# Altium footprint library Diodes.PcbLib: 4 footprints
Each footprint in its own frame and in the unit in brackets; x right, y up, seen from the top. Pads: shape width x height; smd on the part's side, far side on the other; paste and mask are expansions set on the pad; w line width, h text height; cw(c..) or ccw(c..) is an arc to the next point about the centre after c.
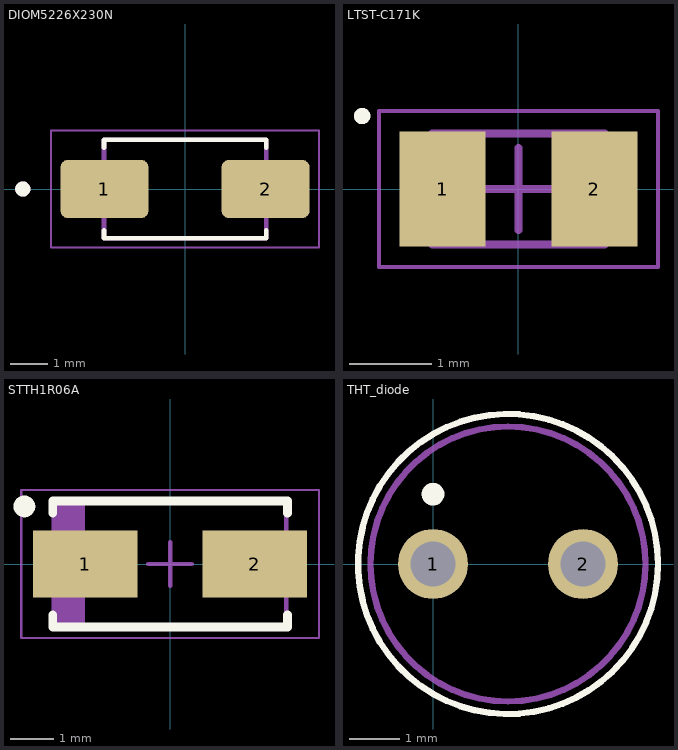
[diagram p0: the footprints below, top view; thin cyan lines are the x and y axes]

## DIOM5226X230N [mm]
pads (2):
  rrect25% 2.33x1.55 smd: 1(-2.135,0) 2(2.135,0)
Top Overlay:
  circle w0.2: c-4.3,0 r0.1
  lines w0.127: -2.15,-1.095 -2.15,-1.302 2.15,-1.302 2.15,-1.095 ; -2.15,1.095 -2.15,1.302 2.15,1.302 2.15,1.095
  text ".DESIGNATOR" at -3.536,1.618 h1
Mechanical 13:
  circle w0.2: c-4.3,0 r0.1
  lines w0.127: -2.15,-1.302 -2.15,1.302 2.15,1.302 2.15,-1.302 -2.15,-1.302
Mechanical 15:
  lines w0.05: -3.55,-1.552 3.55,-1.552 3.55,1.552 -3.55,1.552 -3.55,-1.552
3D body "step_temp.STEP": height 2.4, standoff 0, extent -2.598,-1.302 2.598,1.302

## LTST-C171K [mm] "LED ;SMD; 0805 2x1.25x0.8"
height 0.8
pads (2):
  rect 1.05x1.4 smd: 1(-0.925,0) 2(0.925,0)
Top Overlay:
  circle w0.1: c-1.905,0.889 r0.05
  text ".DESIGNATOR" at -1.27,1.016 h1
Mechanical 13:
  lines w0.1: -1.05,-0.675 -1.05,0.675 1.05,0.675 1.05,-0.675 -1.05,-0.675
Mechanical 15:
  lines w0.05: -1.7,-0.95 -1.7,0.95 1.7,0.95 1.7,-0.95 -1.7,-0.95
  lines w0.1: -0.5,0 0.5,0 ; 0,-0.5 0,0.5
3D body "LTST-C171KRKT.STEP": height 0.8, standoff 0, extent -1,-0.625 1,0.625

## STTH1R06A [mm] "Diode: rectifying; SMD; 600V; 1A; 25ns; SMA; Ufmax: 1V; Ifsm: 20A"
height 2.45
pads (2):
  rect 2.4x1.55 smd: 1(-1.95,0) 2(1.95,0)
Top Overlay:
  circle w0.25: c-3.35,1.325 r0.125
  lines w0.2: -2.7,-1.175 -2.7,-1.45 2.7,-1.45 2.7,-1.175 ; -2.7,1.175 -2.7,1.45 2.7,1.45 2.7,1.175
  text ".DESIGNATOR" at -3.348,1.793 h1
Mechanical 13:
  rectangle: -2.675,-1.45 -1.955,1.45
  lines w0.1: -2.675,-1.45 2.675,-1.45 2.675,1.45 -2.675,1.45 -2.675,-1.45
Mechanical 15:
  lines w0.05: -3.425,-1.7 3.425,-1.7 3.425,1.7 -3.425,1.7 -3.425,-1.7
  lines w0.1: -0.5,0 0.5,0 ; 0,-0.5 0,0.5
3D body "STTH1R06A.step": height 2.45, standoff 0, extent -2.895,-1.45 2.895,1.45

## THT_diode [mm] "tht diode 3mm pitch 5,5mm diameter"
height 8.5
pads (2):
  round 1.4 hole 0.9: 1(0,0) 2(3,0)
Top Overlay:
  circle w0.254: c0,1.397 r0.1
  circle w0.127: c1.5,0 r3
Mechanical 1:
  circle w0.127: c1.5,0 r2.75